# Altium footprint library PcbLib1.PcbLib: 83 footprints (part 1 of 6)
Each footprint in its own frame and in the unit in brackets; x right, y up, seen from the top. Pads: shape width x height; smd on the part's side, far side on the other; paste and mask are expansions set on the pad; w line width, h text height; cw(c..) or ccw(c..) is an arc to the next point about the centre after c.
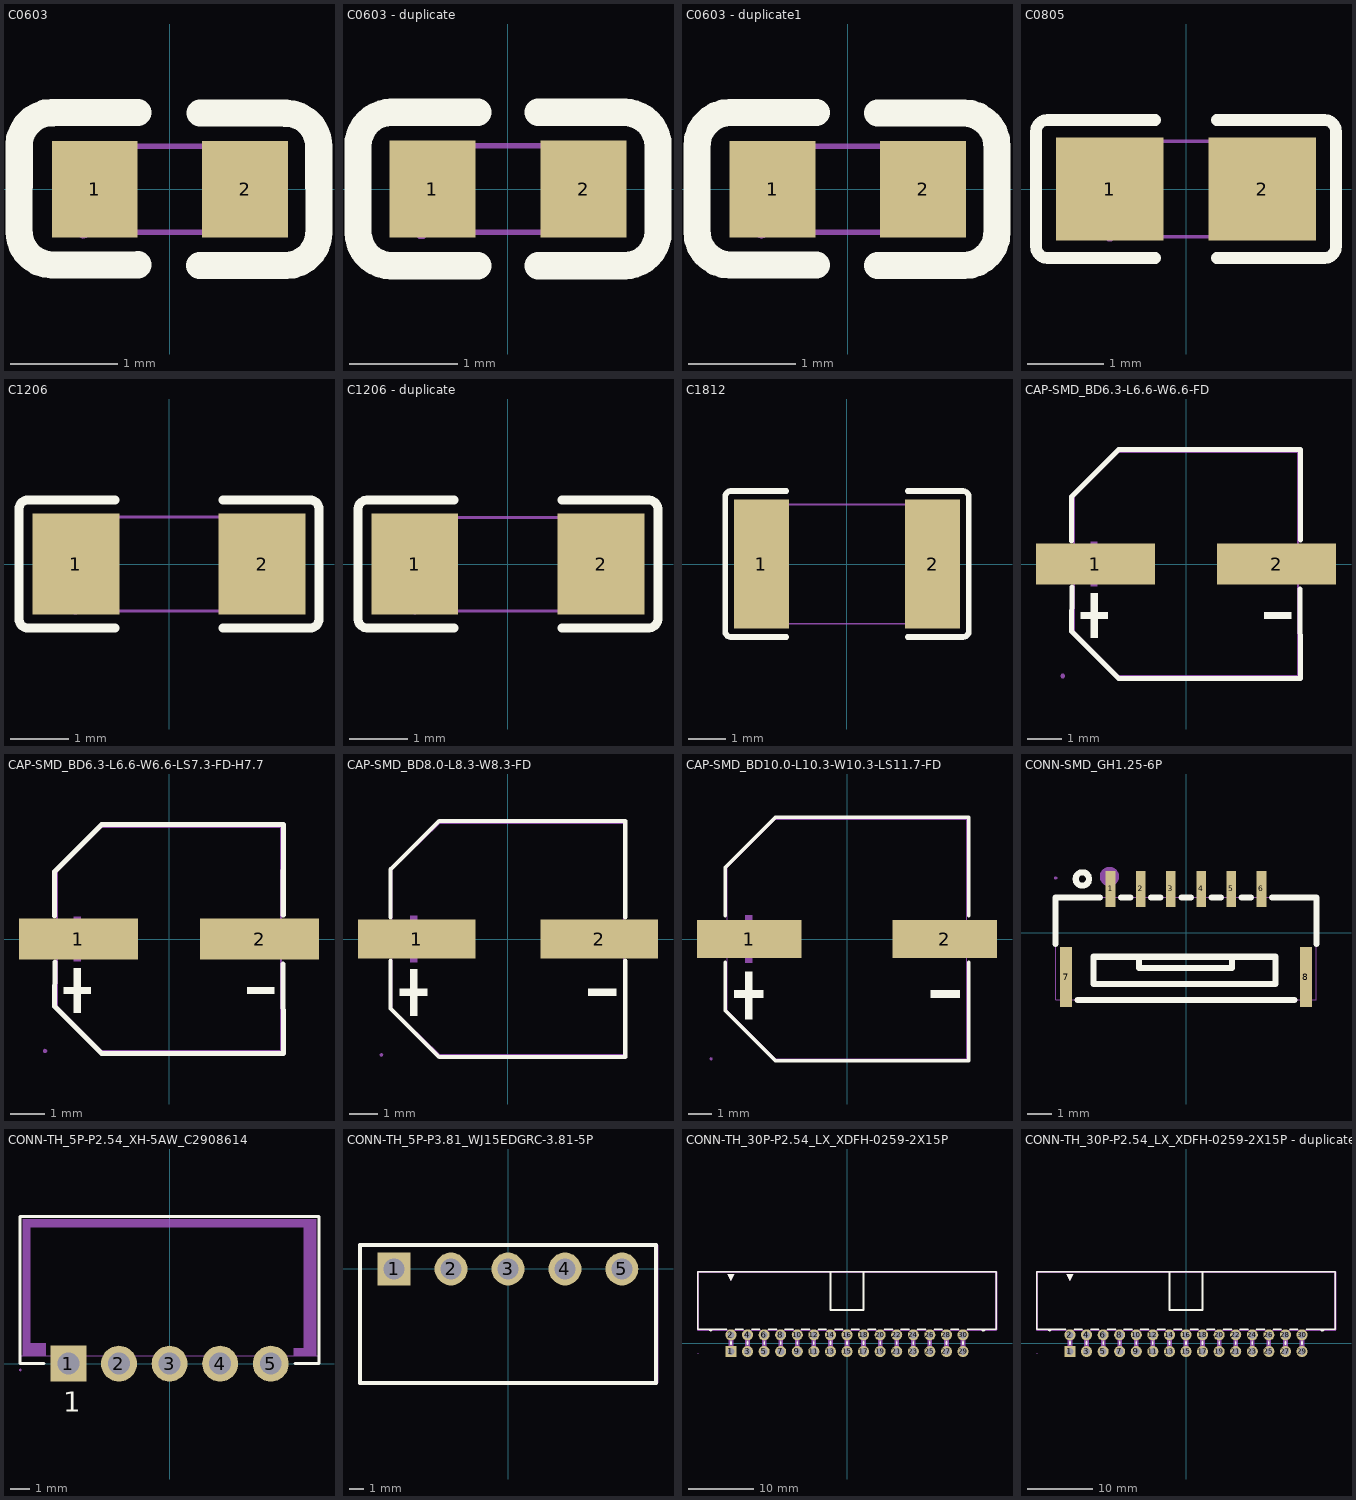
[diagram p0: the footprints below, top view; thin cyan lines are the x and y axes]

## C0603 [mil]
pads (2):
  rect 31.5x35.4 smd: 1(-27.58,0) 2(27.58,0)
Top Overlay:
  lines w10: -55.37,16.05 -55.08,18.74 -54.09,21.28 -52.68,23.55 -50.7,25.53 -48.44,26.94 -45.89,27.93 -43.2,28.21 ; -55.3,15.98 -55.37,-15.49 -55.01,-18.24 -54.16,-20.79 -52.68,-23.12 -50.77,-25.03 -48.44,-26.52 -45.89,-27.36 -43.13,-27.72 -11.67,-27.65 ; -43.13,28.14 -11.67,28.21 ; 10.96,-27.93 42.5,-27.93 45.18,-27.65 47.8,-26.73 50.13,-25.24 52.04,-23.33 53.53,-21 54.38,-18.46 54.73,-15.7 54.66,15.77 54.38,18.46 53.46,21.07 52.04,23.33 50.06,25.31 47.8,26.73 45.18,27.65 42.5,27.93 11.03,28
Mechanical 7:
  lines w2: -31.54,-15.7 31.47,-15.77 31.47,15.77 -31.47,15.77 -31.54,-15.7
Mechanical 8:
  region: -29.13,-15.7 -29.56,-16.97 -30.55,-17.82 -31.89,-18.03 -33.09,-17.54 -33.8,-16.4 -33.73,-15.06 -33.02,-13.93 -31.89,-13.36 -30.55,-13.58 -29.56,-14.43
Mechanical 9:
  region: 31.47,-15.77 31.47,15.77 19.73,15.77 19.66,-15.7
  region: -31.54,-15.7 -31.47,15.77 -19.73,15.77 -19.73,-15.77

## C0603 - duplicate [mm]
pads (2):
  rect 0.8x0.9 smd paste+0.051: 1(-0.7,0) 2(0.7,0)
Top Overlay:
  lines w0.254: -1.08,-0.71 -0.28,-0.71 ; -1.08,0.71 -0.28,0.71 ; -1.08,-0.71 cw(c-1.08,-0.4) -1.39,-0.4 -1.39,0.4 cw(c-1.08,0.4) -1.08,0.71 ; 0.28,-0.71 1.08,-0.71 ccw(c1.08,-0.4) 1.39,-0.4 1.39,0.4 ccw(c1.08,0.4) 1.08,0.71 0.28,0.71
Mechanical 7:
  lines w0.051: -0.8,-0.4 0.8,-0.4 0.8,0.4 -0.8,0.4 -0.8,-0.4
Mechanical 8:
  region: -0.86,-0.4 -0.86,-0.375 -0.825,-0.34 -0.775,-0.34 -0.74,-0.375 -0.74,-0.4 -0.74,-0.425 -0.775,-0.46 -0.825,-0.46 -0.86,-0.425 -0.86,-0.4
Mechanical 9:
  region: 0.8,-0.4 0.8,0.4 0.5,0.4 0.5,-0.4
  region: -0.8,-0.4 -0.8,0.4 -0.5,0.4 -0.5,-0.4

## C0603 - duplicate1 [mil]
pads (2):
  rect 31.5x35.4 smd: 1(-27.6,0) 2(27.6,0)
Top Overlay:
  lines w10: -11.6,-27.7 -43.1,-27.7 -45.8,-27.4 -48.4,-26.5 -50.7,-25 -52.7,-23.1 -54.1,-20.8 -55,-18.2 -55.3,-15.5 -55.3,16 -55,18.7 -54.1,21.3 -52.7,23.6 -50.7,25.6 -48.4,27 -45.8,27.9 -43.1,28.2 -11.6,28.2 ; 11,-27.9 42.5,-27.9 45.2,-27.6 47.8,-26.7 50.1,-25.2 52.1,-23.3 53.5,-21 54.4,-18.4 54.7,-15.7 54.7,15.8 54.4,18.5 53.5,21.1 52.1,23.4 50.1,25.3 47.8,26.8 45.2,27.7 42.5,28 11,28
Mechanical 7:
  lines w2: -31.5,-15.7 31.5,-15.7 31.5,15.8 -31.5,15.8 -31.5,-15.7
Mechanical 8:
  region: -29.1,-15.7 -29.5,-17 -30.5,-17.8 -31.8,-18 -33,-17.5 -33.8,-16.4 -33.8,-15 -33,-13.9 -31.8,-13.4 -30.5,-13.6 -29.5,-14.4
Mechanical 9:
  region: 31.5,-15.7 31.5,15.8 19.7,15.8 19.7,-15.7
  region: -31.5,-15.7 -31.5,15.8 -19.7,15.8 -19.7,-15.7

## C0805 [mm]
pads (2):
  rect 1.41x1.35 smd paste-100 mask+0.051: 1(-1,0) 2(1,0)
Top Overlay:
  lines w0.152: -0.401,-0.904 -1.811,-0.904 cw(c-1.811,-0.751) -1.964,-0.751 -1.964,0.751 cw(c-1.811,0.751) -1.811,0.904 -0.401,0.904 ; 0.401,-0.904 1.811,-0.904 ccw(c1.811,-0.751) 1.964,-0.751 1.964,0.751 ccw(c1.811,0.751) 1.811,0.904 0.401,0.904
Top Paste:
  region: 1.705,0.64 1.705,-0.64 1.655,-0.69 0.505,-0.69 0.455,-0.64 0.45,-0.23 0.9,-0.23 0.9,0.22 0.46,0.22 0.455,0.64 0.505,0.69 1.655,0.69
  region: -1.705,-0.64 -1.705,0.64 -1.655,0.69 -0.505,0.69 -0.455,0.64 -0.45,0.23 -0.9,0.23 -0.9,-0.22 -0.46,-0.22 -0.455,-0.64 -0.505,-0.69 -1.655,-0.69
Mechanical 7:
  lines w0.051: -1,-0.625 1,-0.625 1,0.625 -1,0.625 -1,-0.625
Mechanical 8:
  region: -1,-0.685 -1.025,-0.685 -1.06,-0.65 -1.06,-0.6 -1.025,-0.565 -1,-0.565 -0.975,-0.565 -0.94,-0.6 -0.94,-0.65 -0.975,-0.685 -1,-0.685
Mechanical 9:
  region: 1,0.625 1,-0.625 0.5,-0.625 0.5,0.625
  region: -1,-0.625 -1,0.625 -0.5,0.625 -0.5,-0.625

## C1206 [mm]
pads (2):
  rect 1.485x1.728 smd paste-100 mask+0.051: 1(-1.593,0) 2(1.593,0)
Top Overlay:
  lines w0.152: -0.926,-1.093 -2.411,-1.093 cw(c-2.411,-0.94) -2.564,-0.94 -2.564,0.94 cw(c-2.411,0.94) -2.411,1.093 -0.926,1.093 ; 0.926,-1.093 2.411,-1.093 ccw(c2.411,-0.94) 2.564,-0.94 2.564,0.94 ccw(c2.411,0.94) 2.411,1.093 0.926,1.093
Top Paste:
  region: 0.85,-0.764 0.85,-0.394 0.95,-0.294 1.255,-0.294 1.355,-0.194 1.355,0.194 1.255,0.294 0.95,0.294 0.85,0.394 0.85,0.764 0.95,0.864 2.235,0.864 2.335,0.764 2.335,-0.764 2.235,-0.864 0.95,-0.864
  region: -0.85,-0.764 -0.85,-0.394 -0.95,-0.294 -1.255,-0.294 -1.355,-0.194 -1.355,0.194 -1.255,0.294 -0.95,0.294 -0.85,0.394 -0.85,0.764 -0.95,0.864 -2.235,0.864 -2.335,0.764 -2.335,-0.764 -2.235,-0.864 -0.95,-0.864
Mechanical 7:
  lines w0.051: -1.6,-0.8 -1.6,0.8 1.6,0.8 1.6,-0.8 -1.6,-0.8
Mechanical 8:
  region: -1.6,-0.74 -1.575,-0.74 -1.54,-0.775 -1.54,-0.825 -1.575,-0.86 -1.6,-0.86 -1.625,-0.86 -1.66,-0.825 -1.66,-0.775 -1.625,-0.74 -1.6,-0.74
Mechanical 9:
  region: -1.6,-0.8 -1.6,0.8 -1.1,0.8 -1.1,-0.8
  region: 1.6,-0.8 1.6,0.8 1.1,0.8 1.1,-0.8

## C1206 - duplicate [mil]
pads (2):
  rect 58.5x68 smd paste-3937 mask+2: 1(-62.7,0) 2(62.7,0)
Top Overlay:
  lines w6: -36.4,-43 -94.9,-43 -96.8,-42.7 -98.4,-41.8 -99.8,-40.5 -100.6,-38.8 -100.9,-37 -100.9,37.1 -100.6,38.9 -99.8,40.6 -98.4,41.9 -96.8,42.8 -94.9,43.1 -36.4,43.1 ; 36.5,-43 95,-43 96.8,-42.7 98.5,-41.8 99.8,-40.5 100.7,-38.8 101,-37 101,37.1 100.7,38.9 99.8,40.6 98.5,41.9 96.8,42.8 95,43.1 36.5,43.1
Top Paste:
  region: 33.5,-30 33.5,-15.5 37.4,-11.5 49.4,-11.5 53.4,-7.6 53.4,7.7 49.4,11.6 37.4,11.6 33.5,15.5 33.5,30.1 37.4,34.1 88,34.1 92,30.1 92,-30 88,-34 37.4,-34
  region: -33.4,-30 -33.4,-15.5 -37.4,-11.5 -49.4,-11.5 -53.3,-7.6 -53.3,7.7 -49.4,11.6 -37.4,11.6 -33.4,15.5 -33.4,30.1 -37.4,34.1 -88,34.1 -91.9,30.1 -91.9,-30 -88,-34 -37.4,-34
Mechanical 7:
  lines w2: -63,-31.5 -63,31.5 63,31.5 63,-31.5 -63,-31.5
Mechanical 8:
  region: -60.6,-31.5 -61,-32.7 -62,-33.6 -63.3,-33.8 -64.5,-33.2 -65.2,-32.1 -65.2,-30.8 -64.5,-29.7 -63.3,-29.1 -62,-29.3 -61,-30.2
Mechanical 9:
  region: -63,-31.5 -63,31.5 -43.3,31.5 -43.3,-31.5
  region: 63,-31.5 63,31.5 43.3,31.5 43.3,-31.5

## C1812 [mil]
pads (2):
  rect 58.5x136.1 smd paste-3937 mask+2: 1(-90.2,0) 2(90.3,0)
Top Overlay:
  lines w6: -64,-77 -122.5,-77 -124.3,-76.7 -126,-75.9 -127.3,-74.5 -128.2,-72.9 -128.5,-71 -128.5,71.1 -128.2,72.9 -127.3,74.6 -126,75.9 -124.3,76.8 -122.5,77.1 -64,77.1 ; 64,-77 122.5,-77 124.4,-76.7 126,-75.9 127.4,-74.5 128.2,-72.9 128.5,-71 128.5,71.1 128.2,72.9 127.4,74.6 126,75.9 124.4,76.8 122.5,77.1 64,77.1
Top Paste:
  region: -61,-64.1 -61,-27 -64.9,-23.1 -76.9,-23.1 -80.9,-19.2 -80.9,19.2 -76.9,23.2 -64.9,23.2 -61,27.1 -61,64.1 -64.9,68.1 -115.5,68.1 -119.5,64.1 -119.5,-64.1 -115.5,-68 -64.9,-68
  region: 61,-64.1 61,-27 65,-23.1 77,-23.1 80.9,-19.2 80.9,19.2 77,23.2 65,23.2 61,27.1 61,64.1 65,68.1 115.6,68.1 119.5,64.1 119.5,-64.1 115.6,-68 65,-68
Mechanical 7:
  lines w2: -90.5,-63 90.6,-63 90.6,63 -90.5,63 -90.5,-63
Mechanical 8:
  region: -88.2,-63 -88.5,-64.2 -89.5,-65.1 -90.9,-65.3 -92.1,-64.8 -92.8,-63.6 -92.8,-62.3 -92.1,-61.2 -90.9,-60.6 -89.5,-60.8 -88.5,-61.7
Mechanical 9:
  region: 90.6,-63 90.6,63 70.9,63 70.9,-63
  region: -90.5,-63 -90.5,63 -70.8,63 -70.8,-63

## CAP-SMD_BD6.3-L6.6-W6.6-FD [mm]
pads (2):
  rect 3.5x1.2 smd paste+0.051: 1(-2.67,0) 2(2.67,0)
Top Overlay:
  region: 3.102,-1.419 3.102,-1.617 2.31,-1.617 2.31,-1.419
  region: -3.102,-1.419 -3.102,-1.617 -2.31,-1.617 -2.31,-1.419
  region: -2.805,-0.858 -2.805,-2.178 -2.607,-2.178 -2.607,-0.858
  lines w0.152: -3.376,0.686 -3.376,1.98 -1.98,3.376 3.376,3.376 3.369,0.708 ; -3.362,-0.686 -3.376,-1.981 -1.981,-3.376 3.376,-3.376 3.356,-0.739
Mechanical 6:
  region: 3.102,0.099 3.102,-0.099 2.31,-0.099 2.31,0.099
  region: -3.102,0.099 -3.102,-0.099 -2.31,-0.099 -2.31,0.099
  region: -2.81,0.66 -2.81,-0.66 -2.612,-0.66 -2.612,0.66
Mechanical 7:
  lines w0.051: -3.3,-1.98 -1.98,-3.3 3.3,-3.3 3.3,3.3 -1.98,3.3 -3.3,1.98 -3.3,-1.98
Mechanical 8:
  region: -3.694,-3.3 -3.694,-3.275 -3.659,-3.24 -3.609,-3.24 -3.574,-3.275 -3.574,-3.3 -3.574,-3.325 -3.609,-3.36 -3.659,-3.36 -3.694,-3.325 -3.694,-3.3
Mechanical 9:
  region: 1.067,0.325 3.667,0.325 3.667,-0.325 1.067,-0.325
  region: -3.634,0.325 -1.034,0.325 -1.034,-0.325 -3.634,-0.325

## CAP-SMD_BD6.3-L6.6-W6.6-LS7.3-FD-H7.7 [mm]
pads (2):
  rect 3.5x1.199 smd: 1(-2.672,0) 2(2.67,0)
Top Overlay:
  region: -2.807,-0.856 -2.807,-2.177 -2.609,-2.177 -2.609,-0.856
  region: -3.104,-1.417 -3.104,-1.615 -2.311,-1.615 -2.311,-1.417
  region: 3.101,-1.417 3.101,-1.615 2.309,-1.615 2.309,-1.417
  lines w0.152: -3.378,0.686 -3.378,1.981 -1.981,3.378 3.376,3.378 3.368,0.709 ; -3.363,-0.686 -3.378,-1.981 -1.984,-3.376 3.376,-3.376 3.355,-0.739
Mechanical 6:
  region: -2.807,0.66 -2.807,-0.658 -2.609,-0.658 -2.609,0.66
  region: -3.104,0.099 -3.104,-0.099 -2.311,-0.099 -2.311,0.099
  region: 3.101,0.099 3.101,-0.099 2.309,-0.099 2.309,0.099
Mechanical 7:
  lines w0.051: -3.302,-1.979 -3.302,1.981 -1.981,3.302 3.299,3.302 3.299,-3.299 -1.981,-3.299 -3.302,-1.979
Mechanical 8:
  region: -3.592,-3.299 -3.602,-3.332 -3.627,-3.353 -3.66,-3.358 -3.693,-3.345 -3.711,-3.315 -3.711,-3.282 -3.693,-3.254 -3.66,-3.238 -3.627,-3.244 -3.602,-3.266
Mechanical 9:
  region: 0.998,0.351 3.647,0.351 3.647,-0.348 0.998,-0.348
  region: -3.653,0.351 -1.003,0.351 -1.003,-0.348 -3.653,-0.348

## CAP-SMD_BD8.0-L8.3-W8.3-FD [mm]
pads (2):
  rect 4.201x1.4 smd: 1(-3.266,0) 2(3.269,0)
Top Overlay:
  region: -3.503,-1.077 -3.503,-2.738 -3.254,-2.738 -3.254,-1.077
  region: -3.876,-1.783 -3.876,-2.032 -2.88,-2.032 -2.88,-1.783
  region: 3.876,-1.783 3.876,-2.032 2.88,-2.032 2.88,-1.783
  lines w0.152: -4.201,-0.782 -4.201,-2.489 -2.464,-4.227 4.201,-4.227 4.201,-0.782 ; -4.201,0.782 -4.201,2.492 -2.464,4.227 4.201,4.227 4.201,0.782
Mechanical 6:
  region: -3.503,0.831 -3.503,-0.828 -3.254,-0.828 -3.254,0.831
  region: -3.876,0.124 -3.876,-0.124 -2.88,-0.124 -2.88,0.124
  region: 3.876,0.124 3.876,-0.124 2.88,-0.124 2.88,0.124
Mechanical 7:
  lines w0.051: -4.15,-2.489 -4.15,2.492 -2.464,4.15 4.15,4.15 4.15,-4.15 -2.464,-4.15 -4.15,-2.489
Mechanical 8:
  region: -4.463,-4.15 -4.473,-4.181 -4.498,-4.204 -4.531,-4.209 -4.562,-4.194 -4.582,-4.166 -4.582,-4.133 -4.562,-4.105 -4.531,-4.089 -4.498,-4.094 -4.473,-4.117
Mechanical 9:
  region: -4.524,0.452 -1.575,0.452 -1.575,-0.45 -4.524,-0.45
  region: 1.575,0.452 4.526,0.452 4.526,-0.45 1.575,-0.45

## CAP-SMD_BD10.0-L10.3-W10.3-LS11.7-FD [mil]
pads (2):
  rect 177.2x65 smd: 1(-165.4,0) 2(165.3,0)
Top Overlay:
  region: 190.6,-87.1 190.6,-99.3 141.9,-99.3 141.9,-87.1
  region: -190.6,-87.1 -190.6,-99.3 -142,-99.3 -142,-87.1
  region: -172.4,-55 -172.4,-136.1 -160.2,-136.1 -160.2,-55
  lines w6: -205.8,-39.5 -205.8,-121.6 -121.7,-205.7 205.7,-205.7 205.7,-39.5 ; -205.8,39.6 -205.8,121.7 -121.7,205.8 205.7,205.8 205.7,39.6
Mechanical 6:
  region: 190.6,6.1 190.6,-6 141.9,-6 141.9,6.1
  region: -190.6,6.1 -190.6,-6 -142,-6 -142,6.1
  region: -172.4,40.6 -172.4,-40.5 -160.2,-40.5 -160.2,40.6
Mechanical 7:
  lines w2: -202.8,-121.6 -202.8,121.7 -121.7,202.8 202.7,202.8 202.7,-202.7 -121.7,-202.7 -202.8,-121.6
Mechanical 8:
  region: -228,-202.7 -228.3,-204 -229.4,-204.9 -230.7,-205 -231.9,-204.5 -232.6,-203.4 -232.6,-202 -231.9,-200.9 -230.7,-200.4 -229.4,-200.6 -228.3,-201.4
Mechanical 9:
  region: -230.3,17.8 -92.5,17.8 -92.5,-17.7 -230.3,-17.7
  region: 92.5,17.8 230.3,17.8 230.3,-17.7 92.5,-17.7

## CONN-SMD_GH1.25-6P [mm]
pads (8):
  rect 0.4x1.5 smd paste+0 mask+0.05: 1(-3.125,1.825) 2(-1.875,1.825) 3(-0.625,1.825) 4(0.625,1.825) 5(1.875,1.825) 6(3.125,1.825)
  rect 0.5x2.5 smd paste+0 mask+0.05: 7(-4.96,-1.825) 8(4.96,-1.825)
Top Overlay:
  circle w0.254: c-4.29,2.235 r0.276
  lines w0.254: -5.4,-0.445 -5.4,1.475 -3.556,1.475 ; -4.479,-2.775 4.479,-2.775 ; -2.694,1.475 -2.306,1.475 ; -1.94,-1.005 -1.94,-1.455 1.91,-1.455 1.91,-0.985 ; -1.444,1.475 -1.056,1.475 ; -0.194,1.475 0.194,1.475 ; 1.056,1.475 1.444,1.475 ; 2.306,1.475 2.694,1.475 ; 3.556,1.475 5.4,1.475 5.4,-0.445 ; -3.83,-2.115 -3.83,-0.985 3.71,-0.985 3.71,-2.115 -3.83,-2.115
Mechanical 6:
  circle w0.4: c-3.17,2.335 r0.2
Mechanical 7:
  lines w0.051: -5.4,-2.775 5.4,-2.775 5.4,1.475 -5.4,1.475 -5.4,-2.775
Mechanical 8:
  region: -5.46,2.275 -5.46,2.3 -5.425,2.335 -5.375,2.335 -5.34,2.3 -5.34,2.275 -5.34,2.25 -5.375,2.215 -5.425,2.215 -5.46,2.25 -5.46,2.275
Mechanical 9:
  region: -3.225,2.275 -3.025,2.275 -3.025,1.275 -3.225,1.275
  region: -1.975,2.275 -1.775,2.275 -1.775,1.275 -1.975,1.275
  region: -0.725,2.275 -0.525,2.275 -0.525,1.275 -0.725,1.275
  region: 0.525,2.275 0.725,2.275 0.725,1.275 0.525,1.275
  region: 1.775,2.275 1.975,2.275 1.975,1.275 1.775,1.275
  region: 3.025,2.275 3.225,2.275 3.225,1.275 3.025,1.275
  region: -5.06,-0.875 -4.86,-0.875 -4.86,-2.775 -5.06,-2.775
  region: 4.86,-0.875 5.06,-0.875 5.06,-2.775 4.86,-2.775

## CONN-TH_5P-P2.54_XH-5AW_C2908614 [mm]
pads (5):
  rect 1.801x1.801 hole 1.1 paste+0 mask+0.051: 1(-5.08,0)
  round 1.801 hole 1.1 paste+0 mask+0.051: 2(-2.54,0) 3(0,0) 4(2.54,0) 5(5.08,0)
Top Overlay:
  lines w0.15: -6.299,0 -7.501,0 -7.501,7.399 7.501,7.399 7.501,0 6.299,0
  text "1" at -5.334,-2.413 h1
Mechanical 6:
  region: -6.223,0.381 -6.223,1.016 -6.858,1.016 -6.985,1.016 -6.985,6.858 6.731,6.858 6.731,0.762 6.223,0.762 6.223,0.381 7.366,0.381 7.366,7.239 -7.366,7.239 -7.366,0.381
Mechanical 7:
  lines w0.051: -7.501,0.399 7.501,0.399 7.501,7.399 -7.501,7.399 -7.501,0.399
Mechanical 8:
  region: -7.44,-0.32 -7.45,-0.353 -7.475,-0.376 -7.508,-0.381 -7.539,-0.366 -7.559,-0.338 -7.559,-0.305 -7.539,-0.274 -7.508,-0.262 -7.475,-0.267 -7.45,-0.287
Mechanical 9:
  region: -5.4,0.32 -4.76,0.32 -4.76,-0.32 -5.4,-0.32
  region: -2.86,0.32 -2.22,0.32 -2.22,-0.32 -2.86,-0.32
  region: -0.32,0.32 0.32,0.32 0.32,-0.32 -0.32,-0.32
  region: 2.22,0.32 2.86,0.32 2.86,-0.32 2.22,-0.32
  region: 4.76,0.32 5.4,0.32 5.4,-0.32 4.76,-0.32
Mechanical 10:
  region: -4.76,-0.32 -5.4,-0.32 -5.4,0.681 -4.76,0.681
  region: -2.22,-0.32 -2.86,-0.32 -2.86,0.681 -2.22,0.681
  region: 0.32,-0.32 -0.32,-0.32 -0.32,0.681 0.32,0.681
  region: 2.86,-0.32 2.22,-0.32 2.22,0.681 2.86,0.681
  region: 5.4,-0.32 4.76,-0.32 4.76,0.681 5.4,0.681

## CONN-TH_5P-P3.81_WJ15EDGRC-3.81-5P [mm]
pads (5):
  rect 2.2x2.2 hole 1.4: 1(-7.62,0)
  round 2.2 hole 1.4: 2(-3.81,0) 3(0,0) 4(3.81,0) 5(7.62,0)
Top Overlay:
  lines w0.254: -9.906,-7.625 5.842,-7.625 9.906,-7.625 9.906,1.6 -9.906,1.6 -9.906,-7.551
Mechanical 6:
  region: 5.842,-7.498 9.779,-7.498 9.779,1.473 -9.779,1.473 -9.779,-7.551 -9.787,-7.6 -9.815,-7.64 -9.858,-7.668 -9.906,-7.678 -9.954,-7.668 -9.995,-7.64 -10.023,-7.6 -10.033,-7.551 -10.033,1.6 -10.023,1.648 -9.995,1.689 -9.954,1.717 -9.906,1.727 9.906,1.727 9.954,1.717 9.997,1.689 10.025,1.648 10.033,1.6 10.033,-7.625 10.025,-7.673 9.997,-7.714 9.954,-7.742 9.906,-7.752 5.842,-7.752 5.794,-7.742 5.753,-7.714 5.725,-7.673 5.715,-7.625 5.725,-7.577 5.753,-7.534 5.794,-7.508
  region: -9.906,-7.498 5.842,-7.498 5.89,-7.508 5.933,-7.534 5.961,-7.577 5.969,-7.625 5.961,-7.673 5.933,-7.714 5.89,-7.742 5.842,-7.752 -9.906,-7.752 -9.954,-7.742 -9.995,-7.714 -10.023,-7.673 -10.033,-7.625 -10.023,-7.577 -9.995,-7.534 -9.954,-7.508
Mechanical 7:
  lines w0.051: -9.964,-7.551 -9.964,1.6 9.967,1.6 9.967,-7.551 -9.964,-7.551
Mechanical 8:
  region: -9.903,-7.551 -9.914,-7.582 -9.939,-7.605 -9.972,-7.61 -10.003,-7.597 -10.023,-7.567 -10.023,-7.534 -10.003,-7.506 -9.972,-7.49 -9.939,-7.496 -9.914,-7.518
Mechanical 9:
  region: 7.221,0.399 8.021,0.399 8.021,-0.401 7.221,-0.401
  region: 3.411,0.399 4.211,0.399 4.211,-0.401 3.411,-0.401
  region: -0.399,0.399 0.401,0.399 0.401,-0.401 -0.399,-0.401
  region: -4.209,0.399 -3.409,0.399 -3.409,-0.401 -4.209,-0.401
  region: -8.019,0.399 -7.219,0.399 -7.219,-0.401 -8.019,-0.401

## CONN-TH_30P-P2.54_LX_XDFH-0259-2X15P [mm]
pads (30):
  rect 1.699x1.699 hole 1.1: 1(-17.78,-1.27)
  round 1.699 hole 1.1: 2(-17.78,1.27) 3(-15.24,-1.27) 4(-15.24,1.27) 5(-12.7,-1.27) 6(-12.7,1.27) 7(-10.16,-1.27) 8(-10.16,1.27) 9(-7.62,-1.27) 10(-7.62,1.27) 11(-5.08,-1.27) 12(-5.08,1.27) 13(-2.54,-1.27) 14(-2.54,1.27) 15(0,-1.27) 16(0,1.27) 17(2.54,-1.27) 18(2.54,1.27) 19(5.08,-1.27) 20(5.08,1.27) 21(7.62,-1.27) 22(7.62,1.27) 23(10.16,-1.27) 24(10.16,1.27) 25(12.7,-1.27) 26(12.7,1.27) 27(15.24,-1.27) 28(15.24,1.27) 29(17.78,-1.27) 30(17.78,1.27)
Top Overlay:
  region: -17.78,9.525 -18.288,10.541 -17.272,10.541
  lines w0.254: -22.86,10.93 -22.86,2.131 -18.433,2.131 ; -22.86,10.96 22.86,10.96 ; -21.092,2.131 -21.085,2.07 -21.057,2.014 -21.011,1.971 -20.958,1.943 -20.897,1.935 -20.836,1.943 -20.782,1.971 -20.739,2.017 -20.711,2.07 -20.701,2.131 ; -17.78,-0.188 -17.78,0.188 ; -17.127,2.131 -15.893,2.131 ; -15.24,-0.188 -15.24,0.188 ; -14.587,2.131 -13.353,2.131 ; -12.7,-0.188 -12.7,0.188 ; -12.047,2.131 -10.813,2.131 ; -10.16,-0.188 -10.16,0.188 ; -9.507,2.131 -8.273,2.131 ; -7.62,-0.188 -7.62,0.188 ; -6.967,2.131 -5.733,2.131 ; -5.08,-0.188 -5.08,0.188 ; -4.427,2.131 -3.193,2.131 ; -2.54,-0.188 -2.54,0.188 ; -1.887,2.131 -0.653,2.131 ; 0,-0.188 0,0.188 ; 0.653,2.131 1.887,2.131 ; 2.54,-0.188 2.54,0.188 ; 3.193,2.131 4.427,2.131 ; 5.08,-0.188 5.08,0.188 ; 5.733,2.131 6.967,2.131 ; 7.62,-0.188 7.62,0.188 ; 8.273,2.131 9.507,2.131 ; 10.16,-0.188 10.16,0.188 ; 10.813,2.131 12.047,2.131 ; 12.7,-0.188 12.7,0.188 ; 13.353,2.131 14.587,2.131 ; 15.24,-0.188 15.24,0.188 ; 15.893,2.131 17.127,2.131 ; 17.78,-0.188 17.78,0.188 ; 18.433,2.131 22.86,2.131 ; 20.693,2.101 20.704,2.04 20.731,1.986 20.775,1.943 20.828,1.915 20.889,1.905 20.95,1.915 21.006,1.943 21.049,1.986 21.077,2.042 21.085,2.101 ; 22.86,2.103 22.86,10.93 ; -2.54,5.08 -2.54,10.922 2.54,10.922 2.54,5.08 -2.54,5.08
Mechanical 6:
  region: -17.78,9.525 -18.288,10.541 -17.272,10.541
  region: -22.987,2.032 -22.987,10.922 -22.977,10.97 -22.949,11.011 -22.908,11.039 -22.86,11.049 22.86,11.049 22.908,11.039 22.949,11.011 22.977,10.97 22.987,10.922 22.987,2.032 22.977,1.984 22.949,1.943 22.908,1.915 22.86,1.905 22.812,1.915 22.771,1.943 22.743,1.984 22.733,2.032 22.733,10.795 -22.733,10.795 -22.733,2.032 -22.743,1.984 -22.771,1.943 -22.812,1.915 -22.86,1.905 -22.908,1.915 -22.949,1.943 -22.977,1.984
Mechanical 7:
  lines w0.051: -22.85,1.961 -22.85,10.96 22.85,10.96 22.85,1.961 -22.85,1.961
Mechanical 8:
  region: -22.789,-1.59 -22.799,-1.623 -22.824,-1.643 -22.857,-1.648 -22.89,-1.636 -22.908,-1.608 -22.908,-1.572 -22.89,-1.544 -22.857,-1.532 -22.824,-1.534 -22.799,-1.557
Mechanical 9:
  region: 17.46,1.59 18.1,1.59 18.1,0.95 17.46,0.95
  region: 17.46,-0.95 18.1,-0.95 18.1,-1.59 17.46,-1.59
  region: 14.92,1.59 15.56,1.59 15.56,0.95 14.92,0.95
  region: 14.92,-0.95 15.56,-0.95 15.56,-1.59 14.92,-1.59
  region: 12.38,1.59 13.02,1.59 13.02,0.95 12.38,0.95
  region: 12.38,-0.95 13.02,-0.95 13.02,-1.59 12.38,-1.59
  region: 9.84,1.59 10.48,1.59 10.48,0.95 9.84,0.95
  region: 9.84,-0.95 10.48,-0.95 10.48,-1.59 9.84,-1.59
  region: 7.3,1.59 7.94,1.59 7.94,0.95 7.3,0.95
  region: 7.3,-0.95 7.94,-0.95 7.94,-1.59 7.3,-1.59
  region: 4.76,1.59 5.4,1.59 5.4,0.95 4.76,0.95
  region: 4.76,-0.95 5.4,-0.95 5.4,-1.59 4.76,-1.59
  region: 2.22,1.59 2.86,1.59 2.86,0.95 2.22,0.95
  region: 2.22,-0.95 2.86,-0.95 2.86,-1.59 2.22,-1.59
  region: -0.32,1.59 0.32,1.59 0.32,0.95 -0.32,0.95
  region: -0.32,-0.95 0.32,-0.95 0.32,-1.59 -0.32,-1.59
  region: -2.86,1.59 -2.22,1.59 -2.22,0.95 -2.86,0.95
  region: -2.86,-0.95 -2.22,-0.95 -2.22,-1.59 -2.86,-1.59
  region: -5.4,1.59 -4.76,1.59 -4.76,0.95 -5.4,0.95
  region: -5.4,-0.95 -4.76,-0.95 -4.76,-1.59 -5.4,-1.59
  region: -7.94,1.59 -7.3,1.59 -7.3,0.95 -7.94,0.95
  region: -7.94,-0.95 -7.3,-0.95 -7.3,-1.59 -7.94,-1.59
  region: -10.48,1.59 -9.84,1.59 -9.84,0.95 -10.48,0.95
  region: -10.48,-0.95 -9.84,-0.95 -9.84,-1.59 -10.48,-1.59
  region: -13.02,1.59 -12.38,1.59 -12.38,0.95 -13.02,0.95
  region: -13.02,-0.95 -12.38,-0.95 -12.38,-1.59 -13.02,-1.59
  region: -15.56,1.59 -14.92,1.59 -14.92,0.95 -15.56,0.95
  region: -15.56,-0.95 -14.92,-0.95 -14.92,-1.59 -15.56,-1.59
  region: -18.1,1.59 -17.46,1.59 -17.46,0.95 -18.1,0.95
  region: -18.1,-0.95 -17.46,-0.95 -17.46,-1.59 -18.1,-1.59
Mechanical 10:
  region: -18.1,1.999 -17.46,1.999 -17.46,-1.021 -18.1,-1.021
  region: -15.56,1.999 -14.92,1.999 -14.92,-1.021 -15.56,-1.021
  region: -13.02,1.999 -12.38,1.999 -12.38,-1.021 -13.02,-1.021
  region: -10.48,1.999 -9.84,1.999 -9.84,-1.021 -10.48,-1.021
  region: -7.94,1.999 -7.3,1.999 -7.3,-1.021 -7.94,-1.021
  region: -5.4,1.999 -4.76,1.999 -4.76,-1.021 -5.4,-1.021
  region: 9.84,1.999 10.48,1.999 10.48,-1.021 9.84,-1.021
  region: 7.3,1.999 7.94,1.999 7.94,-1.021 7.3,-1.021
  region: 4.76,1.999 5.4,1.999 5.4,-1.021 4.76,-1.021
  region: 2.22,1.999 2.86,1.999 2.86,-1.021 2.22,-1.021
  region: -0.32,1.999 0.32,1.999 0.32,-1.021 -0.32,-1.021
  region: -2.86,1.999 -2.22,1.999 -2.22,-1.021 -2.86,-1.021
  region: 17.46,1.999 18.1,1.999 18.1,-1.021 17.46,-1.021
  region: 14.92,1.999 15.56,1.999 15.56,-1.021 14.92,-1.021
  region: 12.38,1.999 13.02,1.999 13.02,-1.021 12.38,-1.021

## CONN-TH_30P-P2.54_LX_XDFH-0259-2X15P - duplicate [mm]
pads (30):
  rect 1.699x1.699 hole 1.1: 1(-17.78,-1.27)
  round 1.699 hole 1.1: 2(-17.78,1.27) 3(-15.24,-1.27) 4(-15.24,1.27) 5(-12.7,-1.27) 6(-12.7,1.27) 7(-10.16,-1.27) 8(-10.16,1.27) 9(-7.62,-1.27) 10(-7.62,1.27) 11(-5.08,-1.27) 12(-5.08,1.27) 13(-2.54,-1.27) 14(-2.54,1.27) 15(0,-1.27) 16(0,1.27) 17(2.54,-1.27) 18(2.54,1.27) 19(5.08,-1.27) 20(5.08,1.27) 21(7.62,-1.27) 22(7.62,1.27) 23(10.16,-1.27) 24(10.16,1.27) 25(12.7,-1.27) 26(12.7,1.27) 27(15.24,-1.27) 28(15.24,1.27) 29(17.78,-1.27) 30(17.78,1.27)
Top Overlay:
  region: -17.78,9.525 -18.288,10.541 -17.272,10.541
  lines w0.254: -22.86,10.93 -22.86,2.131 -18.433,2.131 ; -22.86,10.96 22.86,10.96 ; -21.092,2.131 -21.082,2.07 -21.054,2.014 -21.011,1.971 -20.955,1.943 -20.897,1.935 -20.836,1.946 -20.78,1.974 -20.737,2.017 -20.709,2.07 -20.701,2.131 ; -17.78,-0.188 -17.78,0.191 ; -17.125,2.131 -15.893,2.131 ; -15.24,-0.188 -15.24,0.191 ; -14.585,2.131 -13.353,2.131 ; -12.7,-0.188 -12.7,0.191 ; -12.045,2.131 -10.813,2.131 ; -10.16,-0.188 -10.16,0.191 ; -9.505,2.131 -8.273,2.131 ; -7.62,-0.188 -7.62,0.191 ; -6.965,2.131 -5.733,2.131 ; -5.08,-0.188 -5.08,0.191 ; -4.425,2.131 -3.193,2.131 ; -2.54,-0.188 -2.54,0.191 ; -1.885,2.131 -0.653,2.131 ; 0,-0.188 0,0.191 ; 0.655,2.131 1.887,2.131 ; 2.54,-0.188 2.54,0.191 ; 3.195,2.131 4.427,2.131 ; 5.08,-0.188 5.08,0.191 ; 5.735,2.131 6.967,2.131 ; 7.62,-0.188 7.62,0.191 ; 8.275,2.131 9.507,2.131 ; 10.16,-0.188 10.16,0.191 ; 10.815,2.131 12.047,2.131 ; 12.7,-0.188 12.7,0.191 ; 13.355,2.131 14.587,2.131 ; 15.24,-0.188 15.24,0.191 ; 15.895,2.131 17.127,2.131 ; 17.78,-0.188 17.78,0.191 ; 18.435,2.131 22.86,2.131 ; 20.693,2.101 20.704,2.04 20.731,1.986 20.775,1.943 20.831,1.915 20.892,1.905 20.952,1.915 21.006,1.943 21.049,1.986 21.077,2.042 21.087,2.103 ; 22.86,2.103 22.86,10.93 ; -2.54,5.08 -2.54,10.922 2.54,10.922 2.54,5.08 -2.54,5.08
Mechanical 6:
  region: -17.78,9.525 -18.288,10.541 -17.272,10.541
  region: -22.987,2.032 -22.987,10.922 -22.977,10.97 -22.949,11.013 -22.908,11.039 -22.86,11.049 22.86,11.049 22.911,11.039 22.951,11.013 22.979,10.97 22.987,10.922 22.987,2.032 22.979,1.984 22.951,1.943 22.911,1.915 22.86,1.905 22.812,1.915 22.771,1.943 22.743,1.984 22.733,2.032 22.733,10.795 -22.733,10.795 -22.733,2.032 -22.741,1.984 -22.769,1.943 -22.809,1.915 -22.86,1.905 -22.908,1.915 -22.949,1.943 -22.977,1.984
Mechanical 7:
  lines w0.051: -22.85,1.961 -22.85,10.96 22.85,10.96 22.85,1.961 -22.85,1.961
Mechanical 8:
  region: -22.789,-1.59 -22.799,-1.623 -22.824,-1.643 -22.857,-1.648 -22.888,-1.636 -22.906,-1.605 -22.906,-1.572 -22.888,-1.544 -22.857,-1.529 -22.824,-1.534 -22.799,-1.557
Mechanical 9:
  region: 17.46,1.59 18.1,1.59 18.1,0.95 17.46,0.95
  region: 17.46,-0.95 18.1,-0.95 18.1,-1.59 17.46,-1.59
  region: 14.92,1.59 15.56,1.59 15.56,0.95 14.92,0.95
  region: 14.92,-0.95 15.56,-0.95 15.56,-1.59 14.92,-1.59
  region: 12.38,1.59 13.02,1.59 13.02,0.95 12.38,0.95
  region: 12.38,-0.95 13.02,-0.95 13.02,-1.59 12.38,-1.59
  region: 9.84,1.59 10.48,1.59 10.48,0.95 9.84,0.95
  region: 9.84,-0.95 10.48,-0.95 10.48,-1.59 9.84,-1.59
  region: 7.3,1.59 7.94,1.59 7.94,0.95 7.3,0.95
  region: 7.3,-0.95 7.94,-0.95 7.94,-1.59 7.3,-1.59
  region: 4.76,1.59 5.4,1.59 5.4,0.95 4.76,0.95
  region: 4.76,-0.95 5.4,-0.95 5.4,-1.59 4.76,-1.59
  region: 2.22,1.59 2.86,1.59 2.86,0.95 2.22,0.95
  region: 2.22,-0.95 2.86,-0.95 2.86,-1.59 2.22,-1.59
  region: -0.32,1.59 0.32,1.59 0.32,0.95 -0.32,0.95
  region: -0.32,-0.95 0.32,-0.95 0.32,-1.59 -0.32,-1.59
  region: -2.86,1.59 -2.22,1.59 -2.22,0.95 -2.86,0.95
  region: -2.86,-0.95 -2.22,-0.95 -2.22,-1.59 -2.86,-1.59
  region: -5.4,1.59 -4.76,1.59 -4.76,0.95 -5.4,0.95
  region: -5.4,-0.95 -4.76,-0.95 -4.76,-1.59 -5.4,-1.59
  region: -7.94,1.59 -7.3,1.59 -7.3,0.95 -7.94,0.95
  region: -7.94,-0.95 -7.3,-0.95 -7.3,-1.59 -7.94,-1.59
  region: -10.48,1.59 -9.84,1.59 -9.84,0.95 -10.48,0.95
  region: -10.48,-0.95 -9.84,-0.95 -9.84,-1.59 -10.48,-1.59
  region: -13.02,1.59 -12.38,1.59 -12.38,0.95 -13.02,0.95
  region: -13.02,-0.95 -12.38,-0.95 -12.38,-1.59 -13.02,-1.59
  region: -15.56,1.59 -14.92,1.59 -14.92,0.95 -15.56,0.95
  region: -15.56,-0.95 -14.92,-0.95 -14.92,-1.59 -15.56,-1.59
  region: -18.1,1.59 -17.46,1.59 -17.46,0.95 -18.1,0.95
  region: -18.1,-0.95 -17.46,-0.95 -17.46,-1.59 -18.1,-1.59
Mechanical 10:
  region: -18.1,2.002 -17.46,2.002 -17.46,-1.021 -18.1,-1.021
  region: -15.56,2.002 -14.92,2.002 -14.92,-1.021 -15.56,-1.021
  region: -13.02,2.002 -12.38,2.002 -12.38,-1.021 -13.02,-1.021
  region: -10.48,2.002 -9.84,2.002 -9.84,-1.021 -10.48,-1.021
  region: -7.94,2.002 -7.3,2.002 -7.3,-1.021 -7.94,-1.021
  region: -5.4,2.002 -4.76,2.002 -4.76,-1.021 -5.4,-1.021
  region: 9.84,2.002 10.48,2.002 10.48,-1.021 9.84,-1.021
  region: 7.3,2.002 7.94,2.002 7.94,-1.021 7.3,-1.021
  region: 4.76,2.002 5.4,2.002 5.4,-1.021 4.76,-1.021
  region: 2.22,2.002 2.86,2.002 2.86,-1.021 2.22,-1.021
  region: -0.32,2.002 0.32,2.002 0.32,-1.021 -0.32,-1.021
  region: -2.86,2.002 -2.22,2.002 -2.22,-1.021 -2.86,-1.021
  region: 17.46,2.002 18.1,2.002 18.1,-1.021 17.46,-1.021
  region: 14.92,2.002 15.56,2.002 15.56,-1.021 14.92,-1.021
  region: 12.38,2.002 13.02,2.002 13.02,-1.021 12.38,-1.021